# Altium schematic symbol library 5P0SMDJ36CA.SchLib: 1 symbol
Pins are listed as number, name and electrical type; pins without a type are passive.

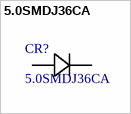
[diagram p0: symbol 5.0SMDJ36CA]

## 5.0SMDJ36CA
designator CR?
No Description Available; Manufacturer_Name: Littelfuse Inc; Copyright: Copyright (C) 2026 Ultra Librarian. All rights reserved.; Manufacturer_Part_Number: 5.0SMDJ36CA
footprint 5.0SMDJSeries_LTF
pins: 1, 2